# Altium schematic symbol library ICs.SchLib: 4 symbols
Pins are listed as number, name and electrical type; pins without a type are passive.

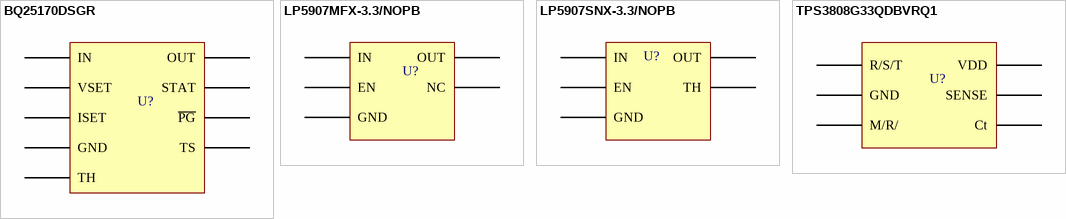
[diagram p0: symbols BQ25170DSGR to TPS3808G33QDBVRQ1]

## BQ25170DSGR
designator U?
pins: 1 IN, 2 ISET, 3 TS, 4 GND, 5 STAT, 6 ~{PG}, 7 VSET, 8 OUT, 9 TH

## LP5907MFX-3.3/NOPB
designator U?
pins: 1 IN, 2 GND, 3 EN, 4 NC, 5 OUT

## LP5907SNX-3.3/NOPB
designator U?
pins: 1 OUT, 2 GND, 3 EN, 4 IN, 5 TH

## TPS3808G33QDBVRQ1
designator U?
pins: 1 R/S/T, 2 GND, 3 M/R/, 4 Ct, 5 SENSE, 6 VDD